# Altium footprint library 1-776180-1.PcbLib: 1 footprints
Each footprint in its own frame and in the unit in brackets; x right, y up, seen from the top. Pads: shape width x height; smd on the part's side, far side on the other; paste and mask are expansions set on the pad; w line width, h text height; cw(c..) or ccw(c..) is an arc to the next point about the centre after c.
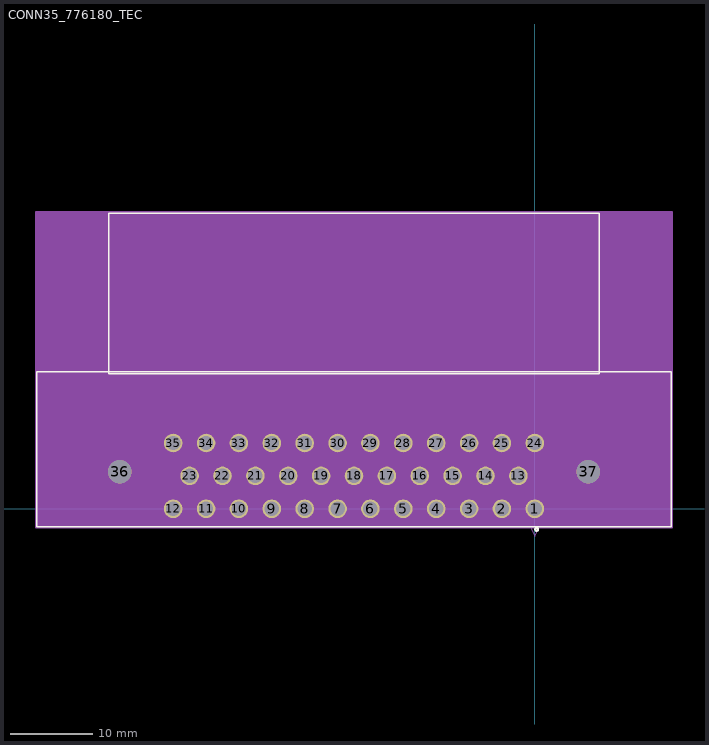
[diagram p0: the footprint, top view; thin cyan lines are the x and y axes]

## CONN35_776180_TEC [mil]
pads (37):
  round 89 hole 69 paste-99999 mask+0: 1(0,0) 2(-157.48,0) 3(-314.96,0) 4(-472.44,0) 5(-629.92,0) 6(-787.4,0) 7(-944.88,0) 8(-1102.36,0) 9(-1259.84,0) 10(-1417.32,0) 11(-1574.8,0) 12(-1732.28,0) 13(-78.74,157.48) 14(-236.22,157.48) 15(-393.7,157.48) 16(-551.18,157.48) 17(-708.66,157.48) 18(-866.14,157.48) 19(-1023.62,157.48) 20(-1181.1,157.48) 21(-1338.58,157.48) 22(-1496.06,157.48) 23(-1653.54,157.48) 24(0,314.96) 25(-157.48,314.96) 26(-314.96,314.96) 27(-472.44,314.96) 28(-629.92,314.96) 29(-787.4,314.96) 30(-944.88,314.96) 31(-1102.36,314.96) 32(-1259.84,314.96) 33(-1417.32,314.96) 34(-1574.8,314.96) 35(-1732.28,314.96)
  round 112 hole 112 unplated paste-99999 mask+0: 36(-1988.19,177.16) 37(255.91,177.16)
Top Overlay:
  circle w10: c8.86,-98.43 r7
  lines w6: -2385.14,-85.43 652.86,-85.43 652.86,656.57 -2385.14,656.57 -2385.14,-85.43 ; -2040.64,646.57 308.36,646.57 308.36,1416.57 -2040.64,1416.57 -2040.64,646.57
  text ".Designator" at -1003.64,626.57 h50
Mechanical 13:
  lines w1: -25,-80.43 0,-130.43 25,-80.43 ; -2380.14,-80.43 647.86,-80.43 647.86,651.57 -2380.14,651.57 -2380.14,-80.43 ; -2035.64,651.57 303.36,651.57 303.36,1411.57 -2035.64,1411.57 -2035.64,651.57
  text ".Designator" at -1003.64,626.57 h50
  text "1" at 71.36,1.57 h50
  text "12" at -1841.14,1.57 h50
  text "24" at 58.86,326.57 h50
  text "35" at -1841.14,326.57 h50
Mechanical 15:
  region: 657.86,-90.43 657.86,1421.57 -2390.14,1421.57 -2390.14,-90.43
  lines w6: -2390.14,-90.43 -2390.14,1421.57 657.86,1421.57 657.86,-90.43 -2390.14,-90.43
3D body "1-776180-1.STEP": height 1281.89, standoff 18.11, extent -2378.78,-80 648.78,1408.19